# Altium schematic symbol library SOCKET mikroBUS 16 TH.SchLib: 1 symbol
Pins are listed as number, name and electrical type; pins without a type are passive.

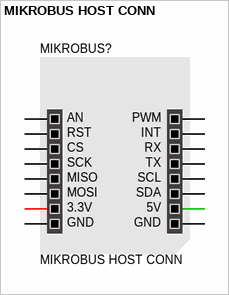
[diagram p0: symbol MIKROBUS HOST CONN]

## MIKROBUS HOST CONN
designator MIKROBUS?
footprint MIKROBUS HOST CONN 8gen TH
pins: 1 AN, 2 RST, 3 CS, 4 SCK, 5 MISO, 6 MOSI, 7 3.3V, 8 GND, 9 GND, 10 5V, 11 SDA, 12 SCL, 13 TX, 14 RX, 15 INT, 16 PWM